# Altium footprint library HSS 2026 PCB Kutubhane.PcbLib: 46 footprints (part 2 of 3)
Each footprint in its own frame and in the unit in brackets; x right, y up, seen from the top. Pads: shape width x height; smd on the part's side, far side on the other; paste and mask are expansions set on the pad; w line width, h text height; cw(c..) or ccw(c..) is an arc to the next point about the centre after c.
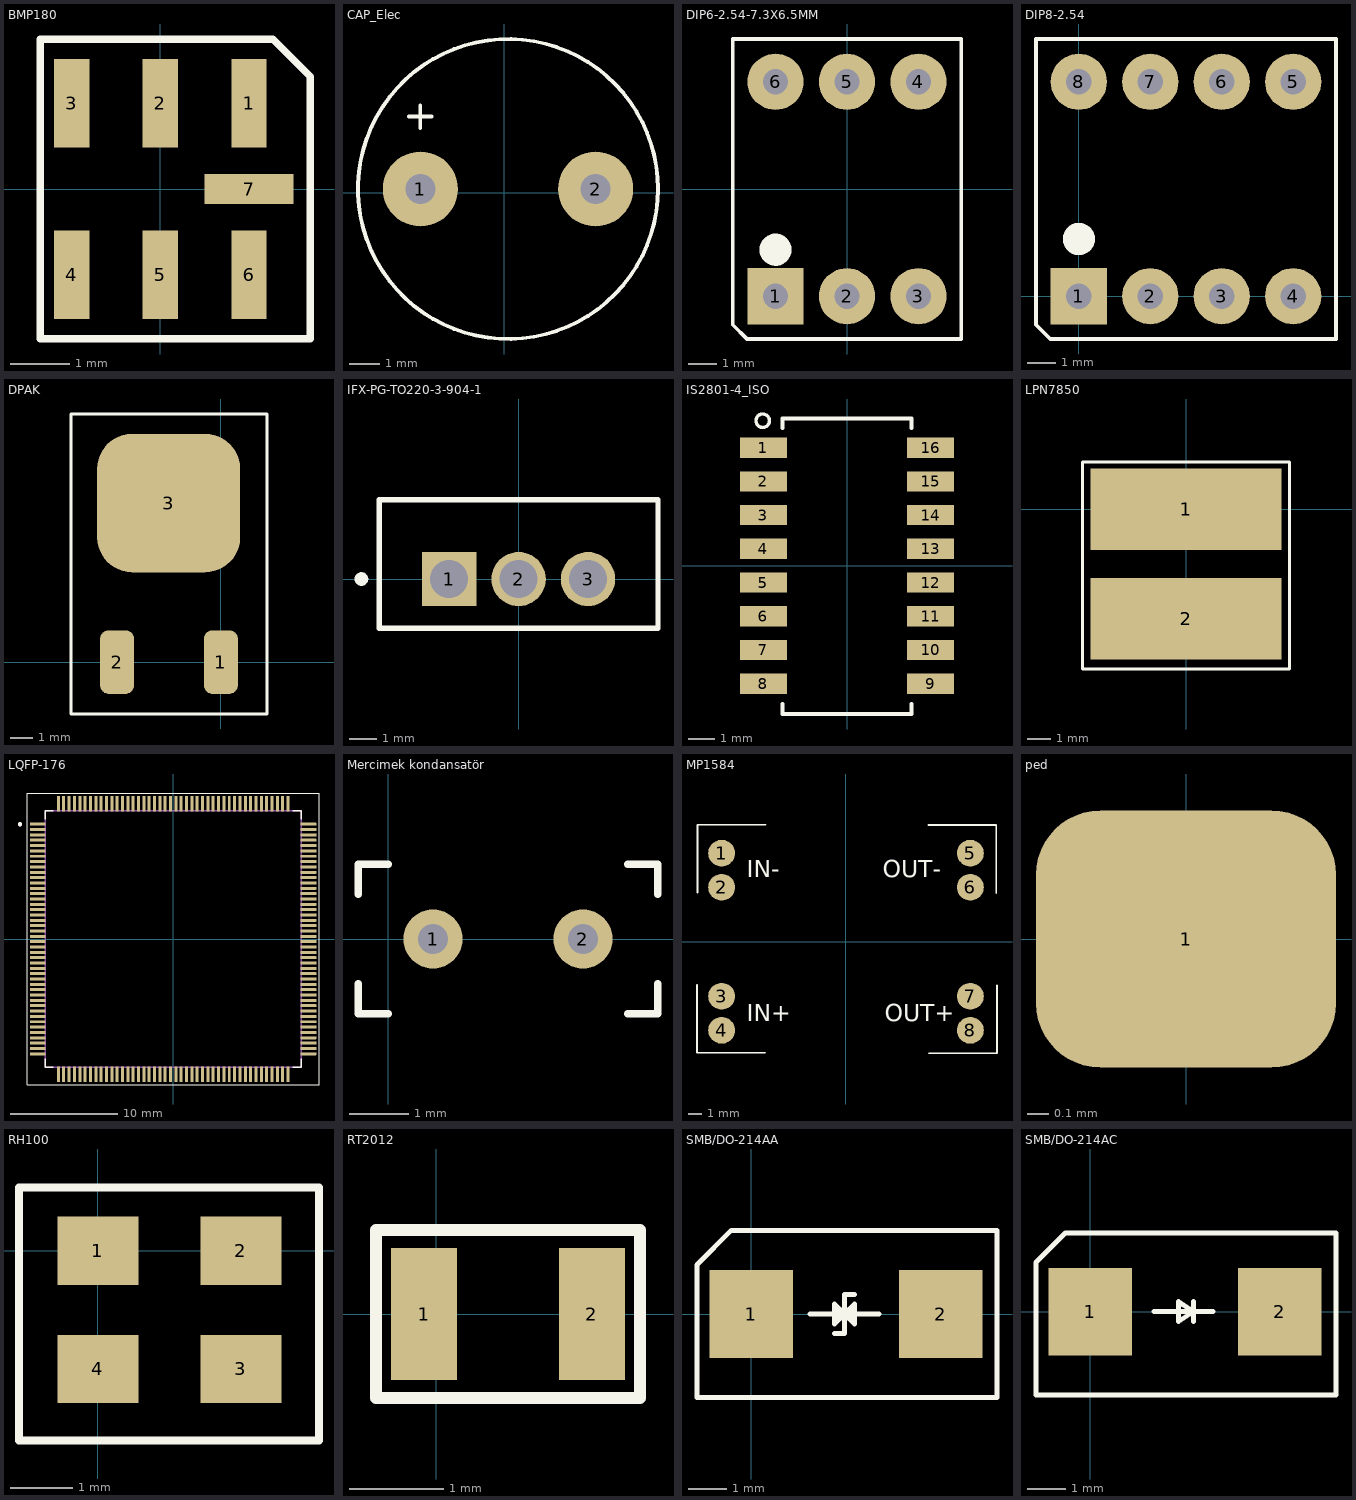
[diagram p1: the footprints below, top view; thin cyan lines are the x and y axes]

## BMP180 [mm]
pads (7):
  rect 0.6x1.5 smd: 1(1.5,1.45) 2(0,1.45) 3(-1.5,1.45) 4(-1.5,-1.45) 5(0,-1.45) 6(1.5,-1.45)
  rect 1.5x0.5 smd: 7(1.5,0)
Top Overlay:
  lines w0.127: -2.032,-2.54 2.54,-2.54 2.54,1.905 1.905,2.54 -2.032,2.54 -2.032,-2.54
3D body "step_temp.STEP": height 1, standoff 0, extent -1.9,-1.8 1.9,1.8

## CAP_Elec [mm]
pads (2):
  round 2.5 hole 1 paste-1 mask+0.508: 1(-2.794,0.127) 2(3.048,0.127)
Top Overlay:
  circle w0.127: c0.127,0.127 r5
  lines w0.127: -3.175,2.54 -2.797,2.54 ; -2.797,2.159 -2.797,2.54 ; -2.797,2.921 -2.797,2.54 ; -2.413,2.54 -2.797,2.54
3D body "Hybrid Capasitor.step": height 17.16, standoff -20.84, extent -5.12,-5.08 5.374,5.42

## DIP6-2.54-7.3X6.5MM [mm]
pads (6):
  rect 2x2 hole 0.9: 1(-2.54,-3.81)
  round 2 hole 0.9: 2(0,-3.81) 3(2.54,-3.81) 4(2.54,3.81) 5(0,3.81) 6(-2.54,3.81)
Top Overlay:
  circle w0.635: c-2.54,-2.159 r0.254
  lines w0.127: -4.064,-4.826 -4.064,5.334 4.064,5.334 4.064,-5.334 -3.556,-5.334 -4.064,-4.826
3D body "4N35--3DModel-STEP-56544.STEP": height 4.8, standoff -2.95, extent -3.56,-4.445 3.56,4.364

## DIP8-2.54 [mm]
pads (8):
  rect 2x2 hole 0.9: 1(0,0)
  round 2 hole 0.9: 2(2.54,0) 3(5.08,0) 4(7.62,0) 5(7.62,7.62) 6(5.08,7.62) 7(2.54,7.62) 8(0,7.62)
Top Overlay:
  circle w0.635: c0,2.032 r0.254
  lines w0.127: -1.524,-1.016 -1.524,9.144 9.144,9.144 9.144,-1.524 -1.016,-1.524 -1.524,-1.016
3D body "HCPL-2411.STEP": height 4.96, standoff -2.95, extent -1.075,0 8.695,7.62

## DPAK [mm]
pads (3):
  rrect50% 1.5x2.8 smd paste-1 mask+0.508: 1(0,0) 2(-4.572,0)
  rrect50% 6.3x6.1 smd paste-1 mask+0.508: 3(-2.3,7)
Top Overlay:
  lines w0.127: -6.604,-2.286 -6.604,10.922 -6.35,10.922 2.032,10.922 2.032,-2.286 -6.604,-2.286
3D body "LD1086DT33TR.step": height 2.4, standoff 0, extent -5.55,-0.763 0.95,8.962

## IFX-PG-TO220-3-904-1 [mm] "TO,flange mount,2.54 mm pitch, 3 pin, 10.16 mm L X 4.57 mm W X 20.56 mm H body"
height 20.56
pads (3):
  rect 1.99x1.99 hole 1.39 paste+0 mask+0: 1(-2.54,0)
  round 1.99 hole 1.39 paste+0 mask+0: 2(0,0) 3(2.54,0)
Top Overlay:
  circle w0.25: c-5.75,0 r0.125
  lines w0.2: -5.1,-1.8 -5.1,2.9 5.1,2.9 5.1,-1.8 -5.1,-1.8
Mechanical 15:
  lines w0.1: -0.5,0 0.5,0 ; 0,-0.5 0,0.5
3D body "PG-TO220-3-904_Z8B00198139_V06_3D.stp": height 19.84, standoff -10.77, extent -5.156,-1.72 5.156,2.86

## IS2801-4_ISO [mil]
pads (16):
  rect 70x30 smd paste+0 mask+10: 1(-124,175) 2(-124,125) 3(-124,75) 4(-124,25) 5(-124,-25) 6(-124,-75) 7(-124,-125) 8(-124,-175) 9(124,-175) 10(124,-125) 11(124,-75) 12(124,-25) 13(124,25) 14(124,75) 15(124,125) 16(124,175)
Top Overlay:
  circle w5: c-125,215 r10
  lines w6: -95.5,-205 -95.5,-220 95.5,-220 95.5,-205 ; -95.5,204.1 -95.5,218.5 95.5,218.5 95.5,204.1
3D body "IS2801-4_ISO.step": height 95.12, standoff 0, extent -141.5,-208.5 141.5,208.5

## LPN7850 [mm]
pads (2):
  rect 8.2x3.5 smd paste-1 mask+0.102: 1(0,0) 2(0,-4.7)
Top Overlay:
  lines w0.127: -4.445,-6.858 -4.445,2.032 4.445,2.032 4.445,-6.858 -4.445,-6.858
3D body "INDUCTOR_73x73h5.step": height 5, standoff 0, extent -3.7,-6.146 3.7,1.32

## LQFP-176 [mm]
height 1.6
pads (176):
  rrect18% 1.47x0.28 smd: 1(-12.67,10.75) 2(-12.67,10.25) 3(-12.67,9.75) 4(-12.67,9.25) 5(-12.67,8.75) 6(-12.67,8.25) 7(-12.67,7.75) 8(-12.67,7.25) 9(-12.67,6.75) 10(-12.67,6.25) 11(-12.67,5.75) 12(-12.67,5.25) 13(-12.67,4.75) 14(-12.67,4.25) 15(-12.67,3.75) 16(-12.67,3.25) 17(-12.67,2.75) 18(-12.67,2.25) 19(-12.67,1.75) 20(-12.67,1.25) 21(-12.67,0.75) 22(-12.67,0.25) 23(-12.67,-0.25) 24(-12.67,-0.75) 25(-12.67,-1.25) 26(-12.67,-1.75) 27(-12.67,-2.25) 28(-12.67,-2.75) 29(-12.67,-3.25) 30(-12.67,-3.75) 31(-12.67,-4.25) 32(-12.67,-4.75) 33(-12.67,-5.25) 34(-12.67,-5.75) 35(-12.67,-6.25) 36(-12.67,-6.75) 37(-12.67,-7.25) 38(-12.67,-7.75) 39(-12.67,-8.25) 40(-12.67,-8.75) 41(-12.67,-9.25) 42(-12.67,-9.75) 43(-12.67,-10.25) 44(-12.67,-10.75) 89(12.67,-10.75) 90(12.67,-10.25) 91(12.67,-9.75) 92(12.67,-9.25) 93(12.67,-8.75) 94(12.67,-8.25) 95(12.67,-7.75) 96(12.67,-7.25) 97(12.67,-6.75) 98(12.67,-6.25) 99(12.67,-5.75) 100(12.67,-5.25) 101(12.67,-4.75) 102(12.67,-4.25) 103(12.67,-3.75) 104(12.67,-3.25) 105(12.67,-2.75) 106(12.67,-2.25) 107(12.67,-1.75) 108(12.67,-1.25) 109(12.67,-0.75) 110(12.67,-0.25) 111(12.67,0.25) 112(12.67,0.75) 113(12.67,1.25) 114(12.67,1.75) 115(12.67,2.25) 116(12.67,2.75) 117(12.67,3.25) 118(12.67,3.75) 119(12.67,4.25) 120(12.67,4.75) 121(12.67,5.25) 122(12.67,5.75) 123(12.67,6.25) 124(12.67,6.75) 125(12.67,7.25) 126(12.67,7.75) 127(12.67,8.25) 128(12.67,8.75) 129(12.67,9.25) 130(12.67,9.75) 131(12.67,10.25) 132(12.67,10.75)
  rrect18% 0.28x1.47 smd: 45(-10.75,-12.67) 46(-10.25,-12.67) 47(-9.75,-12.67) 48(-9.25,-12.67) 49(-8.75,-12.67) 50(-8.25,-12.67) 51(-7.75,-12.67) 52(-7.25,-12.67) 53(-6.75,-12.67) 54(-6.25,-12.67) 55(-5.75,-12.67) 56(-5.25,-12.67) 57(-4.75,-12.67) 58(-4.25,-12.67) 59(-3.75,-12.67) 60(-3.25,-12.67) 61(-2.75,-12.67) 62(-2.25,-12.67) 63(-1.75,-12.67) 64(-1.25,-12.67) 65(-0.75,-12.67) 66(-0.25,-12.67) 67(0.25,-12.67) 68(0.75,-12.67) 69(1.25,-12.67) 70(1.75,-12.67) 71(2.25,-12.67) 72(2.75,-12.67) 73(3.25,-12.67) 74(3.75,-12.67) 75(4.25,-12.67) 76(4.75,-12.67) 77(5.25,-12.67) 78(5.75,-12.67) 79(6.25,-12.67) 80(6.75,-12.67) 81(7.25,-12.67) 82(7.75,-12.67) 83(8.25,-12.67) 84(8.75,-12.67) 85(9.25,-12.67) 86(9.75,-12.67) 87(10.25,-12.67) 88(10.75,-12.67) 133(10.75,12.67) 134(10.25,12.67) 135(9.75,12.67) 136(9.25,12.67) 137(8.75,12.67) 138(8.25,12.67) 139(7.75,12.67) 140(7.25,12.67) 141(6.75,12.67) 142(6.25,12.67) 143(5.75,12.67) 144(5.25,12.67) 145(4.75,12.67) 146(4.25,12.67) 147(3.75,12.67) 148(3.25,12.67) 149(2.75,12.67) 150(2.25,12.67) 151(1.75,12.67) 152(1.25,12.67) 153(0.75,12.67) 154(0.25,12.67) 155(-0.25,12.67) 156(-0.75,12.67) 157(-1.25,12.67) 158(-1.75,12.67) 159(-2.25,12.67) 160(-2.75,12.67) 161(-3.25,12.67) 162(-3.75,12.67) 163(-4.25,12.67) 164(-4.75,12.67) 165(-5.25,12.67) 166(-5.75,12.67) 167(-6.25,12.67) 168(-6.75,12.67) 169(-7.25,12.67) 170(-7.75,12.67) 171(-8.25,12.67) 172(-8.75,12.67) 173(-9.25,12.67) 174(-9.75,12.67) 175(-10.25,12.67) 176(-10.75,12.67)
Top Overlay:
  circle w0.2: c-14.34,10.75 r0.1
  lines w0.05: -13.655,-13.655 13.655,-13.655 13.655,13.655 -13.655,13.655 -13.655,-13.655
  lines w0.127: -12,-11.21 -12,-12 -11.21,-12 ; -12,11.21 -12,12 -11.21,12 ; 11.21,-12 12,-12 12,-11.21 ; 11.21,12 12,12 12,11.21
Mechanical 13:
  circle w0.2: c-14.34,10.75 r0.1
  lines w0.127: -12,-12 -12,12 12,12 12,-12 -12,-12
3D body "step_temp.STEP": height 1.6, standoff 0, extent -13,-13 13,13

## Mercimek kondansatör [mm]
pads (2):
  round 1 hole 0.5 paste-1 mask+0.102: 1(0.762,0) 2(3.302,0)
Top Overlay:
  lines w0.127: -0.508,-0.762 -0.508,-1.016 -0.508,-1.27 0,-1.27 ; -0.508,0.762 -0.508,1.27 -0.254,1.27 0,1.27 ; 4.064,-1.27 4.318,-1.27 4.572,-1.27 4.572,-0.762 ; 4.064,1.27 4.572,1.27 4.572,1.016 4.572,0.762
3D body "10pF Ceramic Disc 3.STEP": height 7.35, standoff -22.68, extent -0.318,-1.25 4.382,1.25

## MP1584 [mm]
pads (8):
  round 2 smd paste-1 mask+0.508: 1(-9.271,6.604) 2(-9.271,4.064) 3(-9.271,-4.064) 4(-9.271,-6.604) 5(9.271,6.604) 6(9.271,4.064) 7(9.271,-4.064) 8(9.271,-6.604)
Top Overlay:
  lines w0.127: -11.11,-3.198 -11.11,-8.278 -6.03,-8.278 ; -11.074,3.647 -11.074,8.727 -5.994,8.727 ; 6.13,8.707 11.21,8.707 11.21,3.627 ; 6.179,-8.316 11.259,-8.316 11.259,-3.236
  text "IN+" at -7.412,-5.923 h1.27
  text "IN-" at -7.412,4.8 h1.27
  text "OUT+" at 2.875,-5.923 h1.27
  text "OUT-" at 2.748,4.8 h1.27
3D body "D-SUN_dcdc_step_down_SIMPLE.step": height 4.1, standoff 0, extent -10.969,-8.172 11.131,8.628

## ped [mm]
pads (1):
  rrect50% 1.4x1.2 smd paste-1 mask+0.102: 1(0,0)

## RH100 [mm]
pads (4):
  rect 1.3x1.1 smd paste-1 mask+0.508: 1(0,0) 2(2.3,0) 3(2.3,-1.9) 4(0,-1.9)
Top Overlay:
  lines w0.127: -1.27,-3.048 -1.27,1.016 3.556,1.016 3.556,-3.048 -1.27,-3.048
3D body "rh100.SLDPRT": height 0.66, standoff 0, extent -0.457,-2.266 2.743,0.234

## RT2012 [mm]
pads (2):
  rect 0.7x1.4 smd paste-1 mask+0.102: 1(-0.127,0) 2(1.651,0)
Top Overlay:
  lines w0.127: -0.635,-0.889 2.159,-0.889 2.159,0.889 -0.635,0.889 -0.635,-0.889
3D body "EPSON_FC1610AN_X1A000121000500.STEP": height 0.5, standoff 0, extent -0.063,-0.525 1.587,0.525

## SMB/DO-214AA [mm]
pads (2):
  rect 2.16x2.26 smd paste-1 mask+0.102: 1(0,0) 2(4.9,0)
Top Overlay:
  region: 2.413,0 2.667,0.254 2.667,-0.254
  region: 2.413,0 2.159,0.254 2.159,-0.254
  lines w0.127: 1.524,0 3.302,0 2.413,0 ; 2.159,-0.508 2.413,-0.508 2.413,-0.254 ; 2.667,0.508 2.413,0.508 2.413,0.254 ; 2.159,-0.254 2.413,0 ; 2.159,-0.254 2.159,0.254 ; 2.159,-0.254 2.413,0 ; 2.159,-0.254 2.159,0.254 ; 2.159,0.254 2.413,0 ; 2.159,0.254 2.413,0 ; 2.413,-0.254 2.413,0 ; 2.413,-0.254 2.413,0.254 ; 2.413,0 2.667,-0.254 2.667,0.254 2.413,0 ; 2.413,0 2.413,0.254 ; -1.397,-2.159 -1.397,1.27 -0.508,2.159 6.35,2.159 6.35,-2.159 -1.397,-2.159
3D body "User Library-DIOM5539X24.sldprt": height 2.45, standoff 0.03, extent -0.337,-1.95 5.163,1.95

## SMB/DO-214AC [mm]
pads (2):
  rect 2.16x2.26 smd paste-1 mask+0.102: 1(0,0) 2(4.9,0)
Top Overlay:
  lines w0.127: 1.651,0 3.175,0 ; 2.667,-0.254 2.667,0.254 ; -1.397,-2.159 -1.397,1.27 -0.635,2.032 6.35,2.032 6.35,-2.159 -1.397,-2.159 ; 2.286,-0.254 2.286,0.254 2.667,0 2.286,-0.254
3D body "User Library-DIOM5539X24.sldprt": height 2.45, standoff 0.03, extent -0.21,-1.995 5.29,1.905